# Altium schematic symbol library Schlib1.SchLib: 18 symbols
Pins are listed as number, name and electrical type; pins without a type are passive.

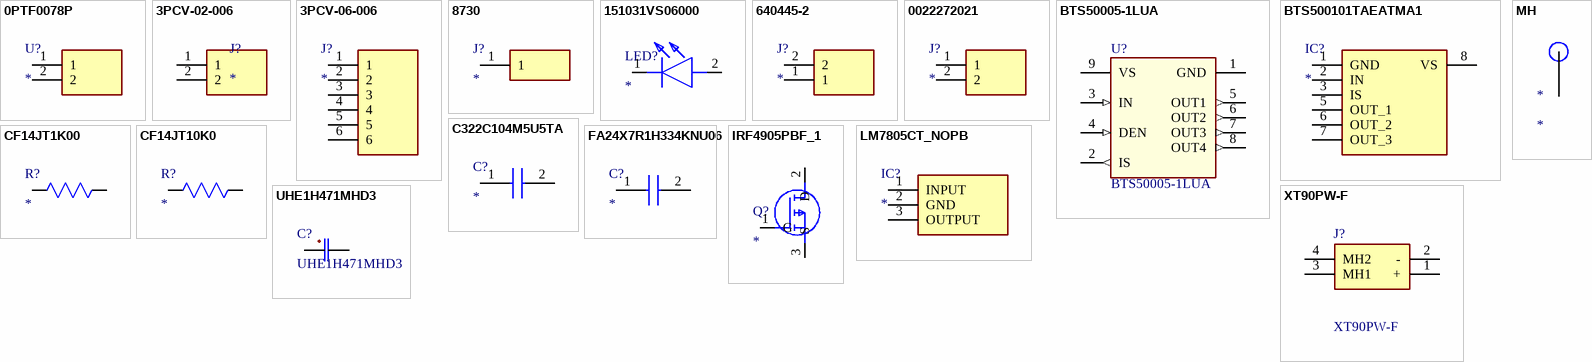
[diagram p0: symbols 0PTF0078P to XT90PW-F]

## 0PTF0078P
designator U?
Undefined or Miscellaneous; Manufacturer_Name: LITTELFUSE; Manufacturer_Part_Number: 0PTF0078P; Datasheet Link: https://media.digikey.com/pdf/Data%20Sheets/Littelfuse%20PDFs/PTF075_77_78.pdf; Height: 11.5mm; Mouser Part Number: 576-0PTF0078P; Mouser Price/Stock: https://www.mouser.co.uk/ProductDetail/Littelfuse/0PTF0078P?qs=Co4VkB5J4%2Fsczy6gG8s%2FsA%3D%3D; Arrow Part Number: 0PTF0078P; Arrow Price/Stock: https://www.arrow.com/en/products/0ptf0078p/littelfuse?utm_currency=USD&region=nac
footprint 0PTF0078P
pins: 1, 2

## 3PCV-02-006
designator J?
Conn Barrier Strip 2 POS 6.35mm Solder ST Thru-Hole 10A/Contact Package; MF: TE Connectivity; MP: 3PCV-02-006; SnapEDA_Link: https://www.snapeda.com/parts/3PCV-02-006/TE+Connectivity+AMP+Connectors/view-part/?ref=snap; Package: None; Value: *; Check_prices: https://www.snapeda.com/parts/3PCV-02-006/TE+Connectivity+AMP+Connectors/view-part/?ref=eda
footprint TE_3PCV-02-006
pins: 1, 2

## 3PCV-06-006
designator J?
Connector; Manufacturer_Name: THOMAS & BETTS; Manufacturer_Part_Number: 3PCV-06-006; Datasheet Link: https://4donline.ihs.com/images/VipMasterEMD/EMD/THBT/THBTS00654/THBTS00654-1.pdf?hkey=EF798316E3902B6ED9A73243A3159BB0; Height: 12.7mm
footprint 3PCV06006
pins: 1, 2, 3, 4, 5, 6

## 8730
designator J?
Connector; Manufacturer_Name: Keystone Electronics; Manufacturer_Part_Number: 8730; Description: KEYSTONE - 8730 - MINI BINDING POST; Datasheet Link: https://www.digikey.ph/en/products/detail/keystone-electronics/8730/2170366; Height: 4.88mm; Mouser Part Number: 534-8730; Mouser Price/Stock: https://www.mouser.co.uk/ProductDetail/Keystone-Electronics/8730?qs=%252B%252BPv0l39JAEHqkiHVP218w%3D%3D
footprint 8730
pins: 1

## 151031VS06000
designator LED?
LED; Manufacturer_Name: Wurth Elektronik; Manufacturer_Part_Number: 151031VS06000; Datasheet Link: https://katalog.we-online.de/led/datasheet/151031VS06000.pdf; Mouser Part Number: 710-151031VS06000; Mouser Price/Stock: https://www.mouser.co.uk/ProductDetail/Wurth-Elektronik/151031VS06000?qs=LlUlMxKIyB01ggED1iKswA%3D%3D
footprint 151034GS03000
pins: 1 K, 2 A

## 640445-2
designator J?
Connector; Manufacturer_Name: TE Connectivity; Manufacturer_Part_Number: 640445-2; Datasheet Link: https://componentsearchengine.com/Datasheets/2/640445-2.pdf; Height: 11.049mm; Mouser Part Number: 5716404452; Mouser Price/Stock: https://www.mouser.co.uk/ProductDetail/TE-Connectivity-AMP/640445-2?qs=P8zzrVhehau7EdfErby3cQ%3D%3D; Arrow Part Number: 640445-2; Arrow Price/Stock: https://www.arrow.com/en/products/640445-2/te-connectivity?utm_currency=USD&region=europe
footprint 6404452
pins: 1, 2

## 0022272021
designator J?
Connector; Manufacturer_Name: Molex; Manufacturer_Part_Number: 0022272021; Datasheet Link: https://www.molex.com/webdocs/datasheets/pdf/en-us/0022272021_PCB_HEADERS.pdf; Height: 11.7mm; Mouser Part Number: N/A; Mouser Price/Stock: https://www.mouser.co.uk/ProductDetail/Molex/0022272021?qs=PBcRNPEHKsoTuJ7eDXMaUA%3D%3D; Arrow Part Number: 0022272021; Arrow Price/Stock: https://www.arrow.com/en/products/0022272021/molex?utm_currency=USD&region=nac
footprint SHDR2W64P0X254_1X2_508X580X1170P
pins: 1, 2

## BTS50005-1LUA
designator U?
Smart High-Side Power Switch; Manufacturer: Infineon Technologies; Manufacturer Order Number: BTS50005-1LUA; PackageReference: PG-HSOF-8-5-6
footprint IFX-PG-HSOF-8-5-6-V (PG-HSOF-8, SMD, 1.2 mm pitch, 9 pin, 10.375 mm L X 9.90 mm W X 2.30 mm H body)
pins: 1 GND (power) "Ground", 2 IS (out) "Sense", 3 IN (in) "Input", 4 DEN (in) "Diagnosis enable", 5 OUT1 (out) "Output", 6 OUT2 (out) "Output", 7 OUT3 (out) "Output", 8 OUT4 (out) "Output", 9 VS (power) "Supply Voltage(Cooling tab)"

## BTS500101TAEATMA1
designator IC?
Integrated Circuit; Manufacturer_Name: Infineon; Manufacturer_Part_Number: BTS500101TAEATMA1; Datasheet Link: https://www.infineon.com/dgdl/Infineon-BTS50010-1TAE-DS-v01_00-EN.pdf?fileId=5546d46264a8de7e0164b1f26319144f; Mouser Part Number: 726-BTS500101TAEATMA; Mouser Price/Stock: https://www.mouser.co.uk/ProductDetail/Infineon-Technologies/BTS500101TAEATMA1?qs=qSfuJ%252Bfl%2Fd4tWJt8ovqZFg%3D%3D; Arrow Part Number: BTS500101TAEATMA1; Arrow Price/Stock: https://www.arrow.com/en/products/bts500101taeatma1/infineon-technologies-ag
footprint PG-TO263-7-3_3
pins: 1 GND, 2 IN, 3 IS, 5 OUT_1, 6 OUT_2, 7 OUT_3, 8 VS

## C322C104M5U5TA
designator C?
Capacitor; Manufacturer_Name: KEMET; Manufacturer_Part_Number: C322C104M5U5TA; Datasheet Link: https://content.kemet.com/datasheets/KEM_C1051_GOLDMAX_Z5U.pdf; Height: 6.6mm; Mouser Part Number: 80-C322C104M5U; Mouser Price/Stock: https://www.mouser.co.uk/ProductDetail/KEMET/C322C104M5U5TA?qs=CDCeLP2tGBsLrnt3J6Fqow%3D%3D; Arrow Part Number: C322C104M5U5TA; Arrow Price/Stock: https://www.arrow.com/en/products/c322c104m5u5ta/kemet-corporation?region=nac
footprint C322C104K1R5TA
pins: 1 +, 2 -

## CF14JT1K00
designator R?
No Description Available; Mfr_Name: Stackpole International
footprint STA_CF14_STP
pins: 1, 2

## CF14JT10K0
designator R?
No Description Available; Mfr_Name: Stackpole International
footprint STA_CF14_STP
pins: 1, 2

## FA24X7R1H334KNU06
designator C?
Capacitor; Manufacturer_Name: TDK; Manufacturer_Part_Number: FA24X7R1H334KNU06; Datasheet Link: https://product.tdk.com/system/files/dam/doc/product/capacitor/ceramic/lead-mlcc/catalog/leadmlcc_halogenfree_fa_en.pdf; Height: 7mm; Mouser Part Number: 810-FA24X7R1H334KNU6; Mouser Price/Stock: https://www.mouser.co.uk/ProductDetail/TDK/FA24X7R1H334KNU06?qs=UrFqKgNWc7RVEnsmQuzgwg%3D%3D
footprint FA24
pins: 1, 2

## IRF4905PBF_1
designator Q?
MOSFET (P-Channel); Manufacturer_Name: Infineon; Manufacturer_Part_Number: IRF4905PBF; Datasheet Link: https://datasheet.datasheetarchive.com/originals/distributors/Datasheets_SAMA/e52aa5f51fe2980ce3912b85b4d53dd4.pdf; Height: 4.69mm; Mouser Part Number: 942-IRF4905PBF; Mouser Price/Stock: https://www.mouser.co.uk/ProductDetail/Infineon-Technologies/IRF4905PBF?qs=9%252BKlkBgLFf39l0HsWdxvdw%3D%3D; Arrow Part Number: IRF4905PBF; Arrow Price/Stock: https://www.arrow.com/en/products/irf4905pbf/infineon-technologies-ag?utm_currency=USD&region=europe
footprint TO254P469X1042X1967-3P
pins: 1 G, 2 D, 3 S

## LM7805CT_NOPB
designator IC?
Integrated Circuit; Manufacturer_Name: Texas Instruments; Manufacturer_Part_Number: LM7805CT/NOPB; Datasheet Link: http://www.ti.com/lit/gpn/lm7800; Height: 4.7mm; Mouser Part Number: 926-LM7805CT/NOPB; Mouser Price/Stock: https://www.mouser.co.uk/ProductDetail/Texas-Instruments/LM7805CT-NOPB?qs=OYMYEaN9QmBS2GvaX6GSkQ%3D%3D; Arrow Part Number: LM7805CT/NOPB; Arrow Price/Stock: https://www.arrow.com/en/products/lm7805ctnopb/texas-instruments?utm_currency=USD&region=nac
footprint TO254P470X1028X1955-3P
pins: 1 INPUT, 2 GND, 3 OUTPUT

## MH
designator *

## UHE1H471MHD3
designator C?
No Description Available; Manufacturer_Name: Nichicon; Copyright: Copyright (C) 2025 Ultra Librarian. All rights reserved.; Manufacturer_Part_Number: UHE1H471MHD3
footprint U1-EE_NCH
pins: 1, 2

## XT90PW-F
designator J?
Connector: DC supply; socket; female; XT90; 40A; 500V; PIN: 2; THT; Manufacturer_Name: Amass; Geometry.Height: 10.3mm; Manufacturer_Part_Number: XT90PW-F; Mouser Part Number: *; Mouser Price/Stock: *; Arrow Part Number: *; Arrow Price/Stock: *; Datasheet Link: https://www.tme.eu/Document/7357a049cc8e5ea73e34d2124a313a81/XT90PW.pdf
footprint XT90PWF
pins: 1 +, 2 -, 3 MH1, 4 MH2